# Altium footprint library FUSC10948X488N.PcbLib: 1 footprints
Each footprint in its own frame and in the unit in brackets; x right, y up, seen from the top. Pads: shape width x height; smd on the part's side, far side on the other; paste and mask are expansions set on the pad; w line width, h text height; cw(c..) or ccw(c..) is an arc to the next point about the centre after c.
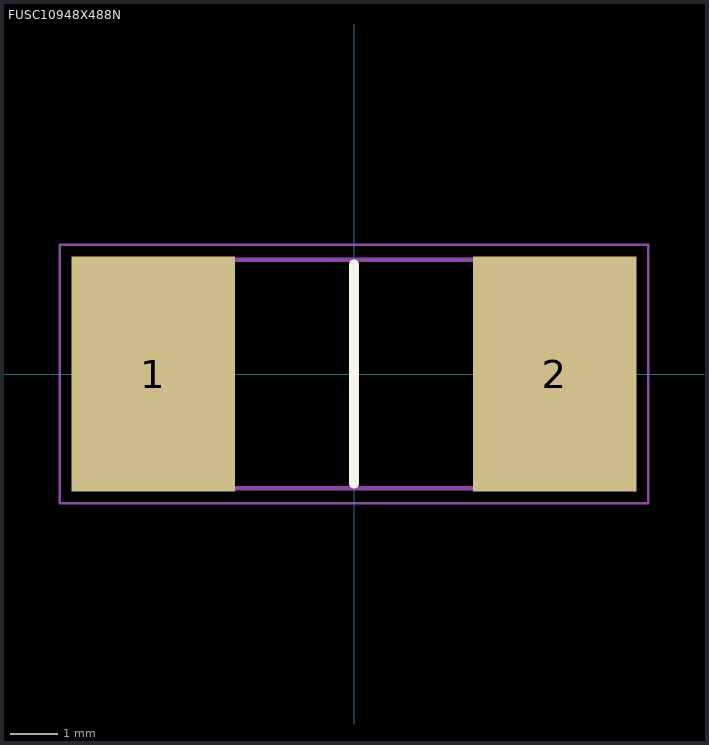
[diagram p0: the footprint, top view; thin cyan lines are the x and y axes]

## FUSC10948X488N [mm]
pads (2):
  rect 3.41x4.91 smd: 1(-4.195,0) 2(4.195,0)
Top Overlay:
  lines w0.2: 0,-2.29 0,2.29
Mechanical 15:
  lines w0.1: -5.43,-2.39 5.43,-2.39 5.43,2.39 -5.43,2.39 -5.43,-2.39
Mechanical 20:
  lines w0.05: -6.15,-2.705 6.15,-2.705 6.15,2.705 -6.15,2.705 -6.15,-2.705